# Altium footprint library HF115F_005-1HS3BF_610_.PcbLib: 1 footprints
Each footprint in its own frame and in the unit in brackets; x right, y up, seen from the top. Pads: shape width x height; smd on the part's side, far side on the other; paste and mask are expansions set on the pad; w line width, h text height; cw(c..) or ccw(c..) is an arc to the next point about the centre after c.
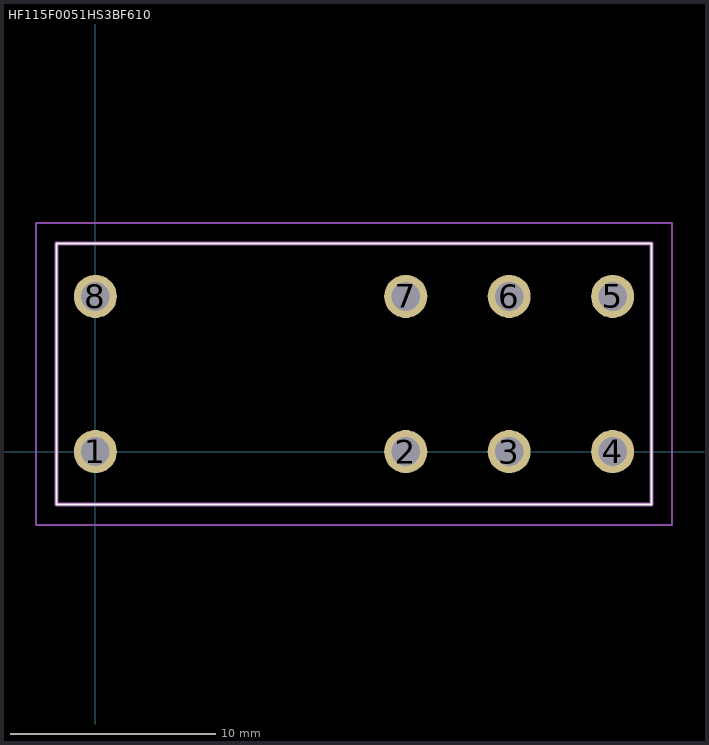
[diagram p0: the footprint, top view; thin cyan lines are the x and y axes]

## HF115F0051HS3BF610 [mm]
pads (8):
  round 2.1 hole 1.4: 1(0,0) 2(15.12,0) 3(20.16,0) 4(25.2,0) 5(25.2,7.56) 6(20.16,7.56) 7(15.12,7.56) 8(0,7.56)
Top Overlay:
  lines w0.1: -1.9,-2.57 27.1,-2.57 27.1,10.13 -1.9,10.13 -1.9,-2.57
Mechanical 15:
  lines w0.2: -1.9,-2.57 27.1,-2.57 27.1,10.13 -1.9,10.13 -1.9,-2.57
Mechanical 20:
  lines w0.1: -2.9,-3.57 28.1,-3.57 28.1,11.13 -2.9,11.13 -2.9,-3.57